# Altium footprint library sEMG.PcbLib: 71 footprints (part 4 of 5)
Each footprint in its own frame and in the unit in brackets; x right, y up, seen from the top. Pads: shape width x height; smd on the part's side, far side on the other; paste and mask are expansions set on the pad; w line width, h text height; cw(c..) or ccw(c..) is an arc to the next point about the centre after c.
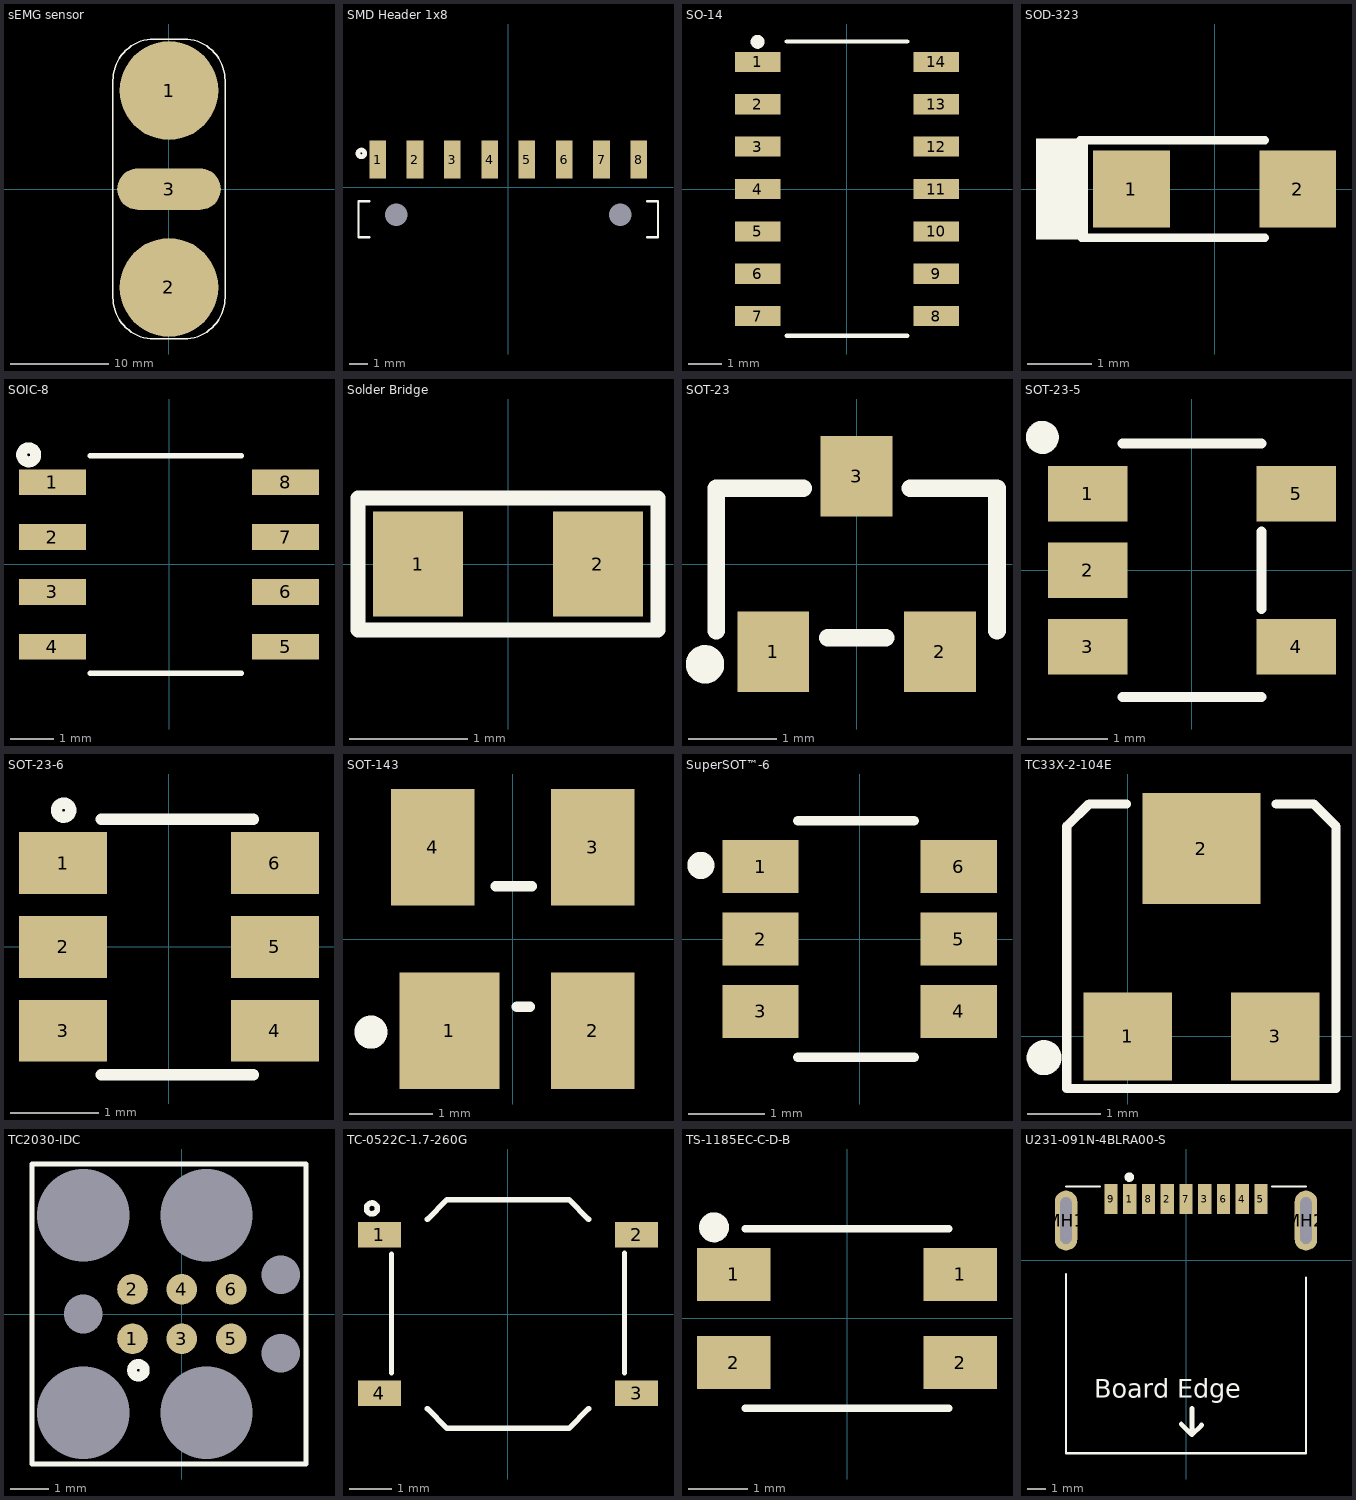
[diagram p3: the footprints below, top view; thin cyan lines are the x and y axes]

## sEMG sensor [mm]
pads (3):
  round 10 smd: 1(0,9.987) 2(0,-9.987)
  oval 10.5x4.2 smd: 3(0,-0.013)
Top Overlay:
  lines w0.127: -5.683,-10.966 ccw(c-1.483,-11.013) -1.531,-15.213 1.531,-15.213 ccw(c1.484,-11.013) 5.683,-10.966 5.683,10.966 ccw(c1.484,11.013) 1.531,15.213 -1.531,15.213 ccw(c-1.483,11.013) -5.683,10.966 -5.683,-10.966

## SMD Header 1x8 [mm]
pads (10):
  rect 0.89x2.03 smd: 1(-7,1.475) 2(-5,1.475) 3(-3,1.475) 4(-1,1.475) 5(1,1.475) 6(3,1.475) 7(5,1.475) 8(7,1.475)
  round 0 hole 1.2 unplated: 2(-6,-1.475) 2(6,-1.475)
Top Overlay:
  circle w0.254: c-7.874,1.803 r0.18
  lines w0.127: -7.442,-2.692 -8.026,-2.692 -8.026,-0.762 -7.442,-0.762 ; 7.442,-2.692 8.026,-2.692 8.026,-0.762 7.442,-0.762
3D body "pin_header_a-sl200-ea-g08mp1.stp": height 2, standoff 0, extent -8,-6.762 8,2.038

## SO-14 [mm] "0.4 V/us 4 1.3MHz 3V ~ 32V, ±1.5V ~ 16V 1.5mA General Purpose SOIC-14_150mil Operational Amplifier ROHS"
pads (14):
  rect 1.37x0.6 smd: 1(-2.675,3.81) 2(-2.675,2.54) 3(-2.675,1.27) 4(-2.675,0) 5(-2.675,-1.27) 6(-2.675,-2.54) 7(-2.675,-3.81) 8(2.675,-3.81) 9(2.675,-2.54) 10(2.675,-1.27) 11(2.675,0) 12(2.675,1.27) 13(2.675,2.54) 14(2.675,3.81)
Top Overlay:
  circle w0.254: c-2.68,4.41 r0.08
  lines w0.127: -1.803,-4.394 1.803,-4.394 ; -1.803,4.42 1.803,4.42
3D body "D14_TEX.step": height 1.76, standoff 0, extent -3.099,-4.369 3.099,4.369

## SOD-323 [mm]
pads (2):
  rect 1.2x1.2 smd: 1(-1.3,0) 2(1.3,0)
Top Overlay:
  rectangle: -2.794,-0.787 -1.981,0.787
  lines w0.127: -2.108,0.762 0.787,0.762 ; -2.083,-0.762 0.787,-0.762
3D body "User Library-SOD323-1.step": height 1.1, standoff 0, extent -1.3,-0.675 1.3,0.675

## SOIC-8 [mm]
pads (8):
  rect 1.55x0.6 smd: 1(-2.7,1.905) 2(-2.7,0.635) 3(-2.7,-0.635) 4(-2.7,-1.905) 5(2.7,-1.905) 6(2.7,-0.635) 7(2.7,0.635) 8(2.7,1.905)
Top Overlay:
  circle w0.254: c-3.251,2.54 r0.163
  lines w0.127: -1.829,-2.515 1.676,-2.515 ; -1.829,2.515 1.676,2.515
3D body "User Library-SOIC-8-1.STEP": height 1.7, standoff -0.05, extent -3,-2.45 3,2.45

## Solder Bridge [mil] "Solder Bridge ON"
pads (2):
  rect 30x35 smd: 1(-30,0) 2(30,0)
Top Overlay:
  lines w5: -50,-22 -50,22 50,22 50,-22 -50,-22

## SOT-23 [mm] "TRANS NPN 40V 0.6A SOT23"
pads (3):
  rect 0.82x0.92 smd: 1(-0.95,-1) 2(0.95,-1) 3(0,1)
Top Overlay:
  circle w0.254: c-1.727,-1.143 r0.092
  lines w0.2: -1.6,-0.762 -1.6,0.864 -0.61,0.864 ; -0.33,-0.838 0.33,-0.838 ; 0.61,0.864 1.6,0.864 1.6,-0.762
3D body "CircuitWorks-SOT-23.step": height 1.05, standoff -0.05, extent -1.5,-1.25 1.5,1.25

## SOT-23-5 [mm]
pads (5):
  rect 0.99x0.69 smd: 1(-1.295,0.95) 2(-1.295,0) 3(-1.295,-0.95) 4(1.295,-0.95) 5(1.295,0.95)
Top Overlay:
  circle w0.254: c-1.86,1.65 r0.078
  lines w0.126: 0.864,-0.483 0.864,0.483
  lines w0.127: -0.864,-1.575 0.864,-1.575 ; -0.864,1.575 0.864,1.575
3D body "SOT-23-5_MC_MCH.step": height 1.45, standoff 0, extent -1.6,-1.549 1.6,1.549

## SOT-23-6 [mm]
pads (6):
  rect 1x0.7 smd: 1(-1.2,0.95) 2(-1.2,0) 3(-1.2,-0.95) 4(1.2,-0.95) 5(1.2,0) 6(1.2,0.95)
Top Overlay:
  circle w0.127: c-1.194,1.549 r0.08
  lines w0.127: -0.769,-1.448 0.959,-1.448 ; -0.769,1.448 0.959,1.448
3D body "NOPB.STEP": height 1.45, standoff 0, extent -1.4,-1.45 1.4,1.45

## SOT-143 [mm]
pads (4):
  rect 1.2x1.4 smd: 1(-0.76,-1.1)
  rect 1x1.4 smd: 2(0.96,-1.1) 3(0.96,1.1) 4(-0.96,1.1)
Top Overlay:
  circle w0.254: c-1.702,-1.118 r0.072
  lines w0.127: -0.203,0.635 0.229,0.635 ; 0.051,-0.813 0.203,-0.813
3D body "User Library-sot143.step": height 1, standoff 0, extent -1.46,-1.21 1.46,1.21

## SuperSOT™-6 [mm]
pads (6):
  rect 1x0.7 smd: 1(-1.3,0.95) 2(-1.3,0) 3(-1.3,-0.95) 4(1.3,-0.95) 5(1.3,0) 6(1.3,0.95)
Top Overlay:
  circle w0.254: c-2.083,0.965 r0.051
  lines w0.127: -0.813,-1.549 0.711,-1.549 ; -0.813,1.549 0.711,1.549
3D body "User Library-SSOT-6.STEP": height 1.05, standoff 0, extent -1.5,-1.501 1.5,1.499

## TC33X-2-104E [mm]
pads (3):
  rect 1.2x1.2 smd: 1(0,0) 3(2,0)
  rect 1.6x1.5 smd: 2(1,2.55)
Top Overlay:
  circle w0.254: c-1.134,-0.287 r0.11
  lines w0.127: -0.016,3.155 -0.524,3.155 -0.826,2.853 -0.826,-0.705 2.826,-0.705 2.826,2.853 2.524,3.155 2.016,3.155
3D body "TC-33X-2.stp": height 1.13, standoff -0.02, extent -0.76,-0.64 2.84,3.322

## TC2030-IDC [mm] "CABLE ADAPTER 6 POS"
pads (14):
  round 0.787 smd: 1(-1.27,-0.635) 1(-1.27,-0.635) 2(-1.27,0.635) 3(0,-0.635) 4(0,0.635) 5(1.27,-0.635) 6(1.27,0.635)
  round 0 hole 2.375 unplated mask+0.102: MP1(-2.54,-2.54) MP2(0.635,-2.54) MP3(0.635,2.54) MP4(-2.54,2.54)
  round 0 hole 0.991 unplated mask+0.102: MP5(-2.54,0) MP6(2.54,-1.016) MP7(2.54,1.016)
Top Overlay:
  circle w0.254: c-1.118,-1.448 r0.163
  lines w0.127: -3.861,-3.861 3.2,-3.861 3.2,3.861 -3.861,3.861 -3.861,-3.861

## TC-0522C-1.7-260G [mm]
pads (4):
  rect 1x0.6 smd: 1(-3,1.85) 2(3,1.85) 3(3,-1.85) 4(-3,-1.85)
Top Overlay:
  circle w0.127: c-3.175,2.464 r0.127
  lines w0.127: -2.718,-1.372 -2.718,1.397 ; -1.88,-2.21 -1.422,-2.667 1.422,-2.667 1.88,-2.21 ; -1.88,2.21 -1.422,2.667 1.422,2.667 1.88,2.21 ; 2.718,-1.372 2.718,1.422
3D body "PTS526 SMG15 SMTR2 LFS--3DModel-STEP-1.STEP": height 1.7, standoff 0, extent -3.2,-2.6 3.2,2.6

## TS-1185EC-C-D-B [mm]
pads (4):
  rect 1.25x0.9 smd: 1(-1.925,0.75) 1(1.925,0.75) 2(-1.925,-0.75) 2(1.925,-0.75)
Top Overlay:
  circle w0.254: c-2.261,1.549 r0.127
  lines w0.127: -1.727,-1.524 1.727,-1.524 ; -1.727,1.524 1.727,1.524
3D body "ts-1185ec-c-d-b.stp": height 2, standoff 0, extent -2.325,-1.5 2.325,1.5

## U231-091N-4BLRA00-S [mm] "USB 3.0 1 Surface Mount 9 Female -40?~+85? Type-A SMD USB Connectors ROHS"
pads (11):
  rect 0.7x1.6 smd: 1(-3,3.275) 2(-1,3.275) 3(1,3.275) 4(3,3.275) 5(4,3.275) 6(2,3.275) 7(0,3.275) 8(-2,3.275) 9(-4,3.275)
  oval 1.2x3.2 hole 0.6 slot 2.5 at 90 deg: MH1(-6.4,2.125) MH2(6.4,2.125)
Top Overlay:
  circle w0.254: c-3.023,4.442 r0.127
  lines w0.127: -6.4,-0.737 -6.4,-10.284 6.4,-10.284 6.4,-0.914 ; -6.4,3.941 -4.584,3.941 ; 4.584,3.941 6.4,3.941
  lines w0.254: -0.253,-8.727 0.318,-9.298 ; 0.318,-7.901 0.318,-9.298 ; 0.834,-8.782 0.318,-9.298
  text "Board Edge" at -4.889,-7.314 h1
3D body "125.STEP": height 6.98, standoff -2.12, extent -6.525,-10.197 6.575,4.003